# Altium footprint library PcbLib1.PcbLib: 37 footprints (part 1 of 3)
Each footprint in its own frame and in the unit in brackets; x right, y up, seen from the top. Pads: shape width x height; smd on the part's side, far side on the other; paste and mask are expansions set on the pad; w line width, h text height; cw(c..) or ccw(c..) is an arc to the next point about the centre after c.
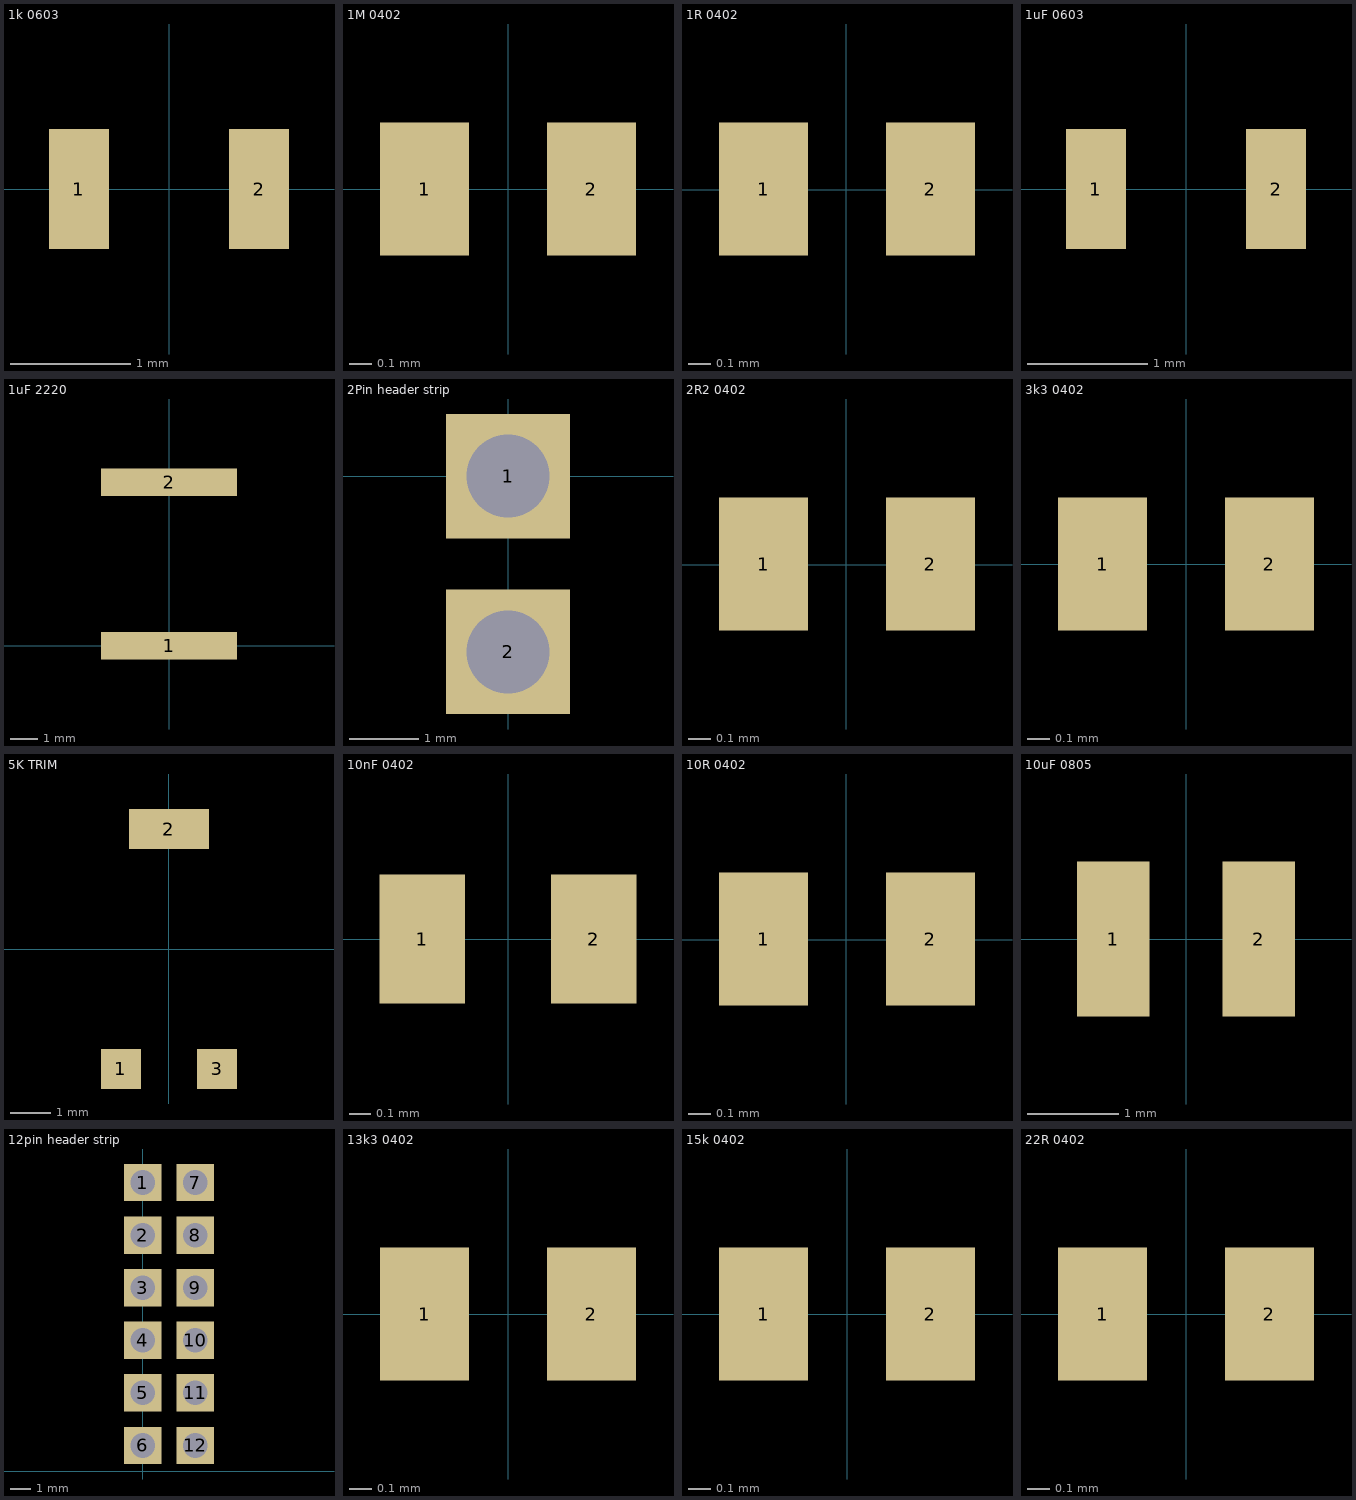
[diagram p0: the footprints below, top view; thin cyan lines are the x and y axes]

## 1k 0603 [mm] "ERA-3AEB102V"
pads (2):
  rect 0.5x1 smd: 1(-0.75,0) 2(0.75,0)
3D body "ERA-3AEB102V.stp": height 0.46, standoff 0.01, extent -0.8,-0.4 0.8,0.4

## 1M 0402 [mm] "RC0402FR-7D1ML"
pads (2):
  rect 0.4x0.6 smd: 1(-0.375,0) 2(0.375,0)
3D body "RC0402FR-7D1ML.stp": height 0.41, standoff 0.01, extent -0.5,-0.25 0.5,0.25

## 1R 0402 [mm] "CRT0402-FZ-1R00GLF"
pads (2):
  rect 0.4x0.6 smd: 1(-0.371,0.003) 2(0.379,0.003)
3D body "ERA-2AKD220X.stp": height 0.36, standoff 0.01, extent -0.496,-0.247 0.504,0.253

## 1uF 0603 [mm] "CGA3E1X7R1E105K080AC"
pads (2):
  rect 0.5x1 smd: 1(-0.75,0) 2(0.75,0)
3D body "CGA3E1X7R1E105K080AC.stp": height 0.81, standoff 0.01, extent -0.8,-0.4 0.8,0.4

## 1uF 2220 [mm] "KTS251B105M55N0T00"
pads (2):
  rect 5x1 smd: 1(0,0) 2(0,6)
3D body "GCJ55DR72E105KXJ1L.stp": height 2, standoff 0, extent -2.5,0.15 2.5,5.85

## 2Pin header strip [mm]
pads (2):
  rect 1.8x1.8 hole 1.2: 1(0,0) 2(0,-2.54)
3D body "TSW-102-07-G-S.stp": height 9.28, standoff -2.91, extent -1.245,-3.942 1.295,1.265

## 2R2 0402 [mm] "CRT0402-FZ-2R00GLF"
pads (2):
  rect 0.4x0.6 smd: 1(-0.371,0.003) 2(0.379,0.003)
3D body "ERA-2AKD220X.stp": height 0.36, standoff 0.01, extent -0.496,-0.247 0.504,0.253

## 3k3 0402 [mm] "ERJ-U02F3301X"
pads (2):
  rect 0.4x0.6 smd: 1(-0.375,0) 2(0.375,0)
3D body "ERJ-U02F3301X.stp": height 0.36, standoff 0.01, extent -0.5,-0.25 0.5,0.25

## 5K TRIM [mm] "3314G-1-502E"
pads (3):
  rect 1x1 smd: 1(-1.2,-3) 3(1.2,-3)
  rect 2x1 smd: 2(0,3)
3D body "3314G-1-502E.stp": height 2.74, standoff 0.01, extent -2.5,-3.099 2.5,3.099

## 10nF 0402 [mm] "C0402C103J5RACTU"
pads (2):
  rect 0.4x0.6 smd: 1(-0.4,0) 2(0.4,0)
3D body "C0402C103J5RACTU.stp": height 0.56, standoff 0.01, extent -0.525,-0.275 0.525,0.275

## 10R 0402 [mm] "CRT0402-DZ-10R0GLF"
pads (2):
  rect 0.4x0.6 smd: 1(-0.371,0.003) 2(0.379,0.003)
3D body "ERA-2AKD220X.stp": height 0.36, standoff 0.01, extent -0.496,-0.247 0.504,0.253

## 10uF 0805 [mm] "GRJ21BR61E106KE01K"
pads (2):
  rect 0.8x1.7 smd: 1(-0.8,0) 2(0.8,0)
3D body "GRJ21BR61E106KE01K.stp": height 1.26, standoff 0.01, extent -1,-0.725 1,0.725

## 12pin header strip [mm] "TSW-112-07-G-S"
pads (12):
  rect 1.8x1.8 hole 1.2: 1(0,13.95) 2(0,11.41) 3(0,8.87) 4(0,6.33) 5(0,3.79) 6(0,1.25) 7(2.54,13.95) 8(2.54,11.41) 9(2.54,8.87) 10(2.54,6.33) 11(2.54,3.79) 12(2.54,1.25)
3D body "10129381-912002BLF.stp": height 8.39, standoff -2.28, extent -1.165,0.05 3.665,15.29

## 13k3 0402 [mm] "CRCW040213K3FKED"
pads (2):
  rect 0.4x0.6 smd: 1(-0.375,0) 2(0.375,0)
3D body "CRCW040213K3FKED.stp": height 0.36, standoff 0.01, extent -0.5,-0.25 0.5,0.25

## 15k 0402 [mm] "CRCW040215K0FKED"
pads (2):
  rect 0.4x0.6 smd: 1(-0.375,0) 2(0.375,0)
3D body "ERA-2AKD220X.stp": height 0.36, standoff 0.01, extent -0.5,-0.25 0.5,0.25

## 22R 0402 [mm] "ERA-2AKD220X"
pads (2):
  rect 0.4x0.6 smd: 1(-0.375,0) 2(0.375,0)
3D body "ERA-2AKD220X.stp": height 0.36, standoff 0.01, extent -0.5,-0.25 0.5,0.25